# Altium footprint library LimeMicroAltiumLib.PcbLib: 876 footprints (part 41 of 57)
Each footprint in its own frame and in the unit in brackets; x right, y up, seen from the top. Pads: shape width x height; smd on the part's side, far side on the other; paste and mask are expansions set on the pad; w line width, h text height; cw(c..) or ccw(c..) is an arc to the next point about the centre after c.
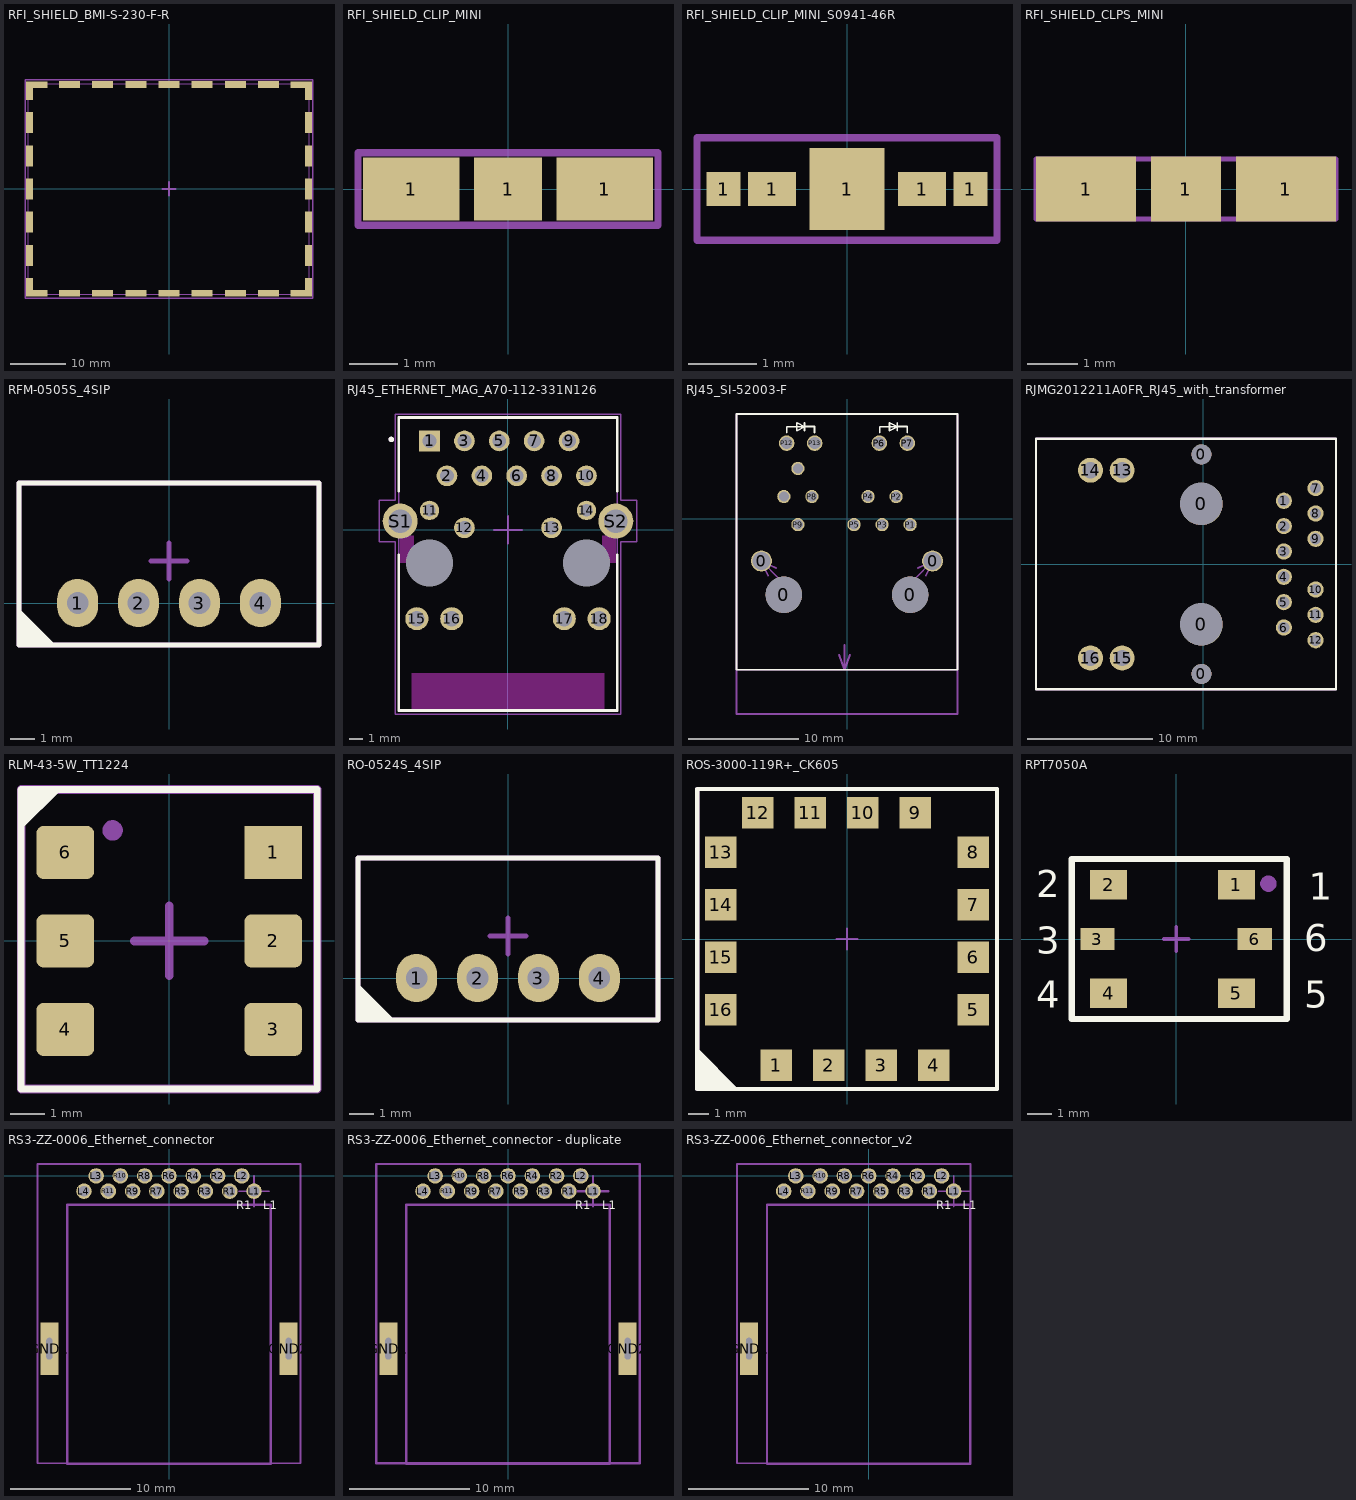
[diagram p40: the footprints below, top view; thin cyan lines are the x and y axes]

## RFI_SHIELD_28x42 [mm] "RFI SHIELD SMS-459C"
height 3
3D body: height 3, standoff 2.9, extent 0.525,0.525 27.788,41.813
3D body: height 3, standoff 0, extent 0.525,0 27.788,0.525
3D body: height 3, standoff 0, extent 0,0 0.525,42.338
3D body: height 3, standoff 0, extent 27.788,0 28.313,42.338
3D body: height 3, standoff 0, extent 0.525,41.813 27.788,42.338

## RFI_SHIELD_BMI-S-230-F-R [mm]
pads (32):
  rect 1.2x3.35 smd mask+0.05: 1(-25.2,-17.787) 1(-25.2,17.762) 1(25.2,-17.787) 1(25.2,17.762)
  rect 1.2x3.8 smd mask+0.05: 1(-25.2,-12.013) 1(-25.2,-6.013) 1(-25.2,-0.012) 1(-25.2,5.988) 1(-25.2,11.988) 1(25.2,-12.013) 1(25.2,-6.013) 1(25.2,-0.012) 1(25.2,5.988) 1(25.2,11.988)
  rect 3.85x1.2 smd mask+0.05: 1(-23.875,-18.862) 1(-23.875,18.838) 1(23.875,-18.862) 1(23.875,18.838)
  rect 3.8x1.2 smd mask+0.05: 1(-18,-18.837) 1(-18,18.863) 1(-12,-18.837) 1(-12,18.863) 1(-6,-18.837) 1(-6,18.863) 1(0,-18.837) 1(0,18.863) 1(6,-18.837) 1(6,18.863) 1(12,-18.837) 1(12,18.863) 1(18,-18.837) 1(18,18.863)
Mechanical 13:
  lines w0.15: -25.425,-19.062 -25.425,19.037 25.375,19.037 25.375,-19.062 -25.425,-19.062 ; -17.65,-19.062 -17.65,-19.063
Mechanical 15:
  lines w0.3: -1.25,0 1.25,0 ; 0,-1.25 0,1.25 ; -26,-19.75 -26,19.75 26,19.75 26,-19.75 -26,-19.75
  text "RF shield (frame + cover)" at -8.25,-19 h0.55
  text ".Designator" at 0,0 h0.55
3D body "Masach Technologies-MS511-20.STEP": height 6.6, standoff -0.8, extent -26.15,-19.8 26.15,19.8

## RFI_SHIELD_CLIP_MINI [mm] "RFI SHIELD CLIP MINI TIN SMD, S0971-46R"
pads (3):
  rect 2x1.3 smd mask+0.05: 1(-2,0) 1(2,0)
  rect 1.4x1.3 smd mask+0.05: 1(0,0)
Mechanical 15:
  lines w0.15: -0.2,0 0,0 ; 0,-0.2 0,0 ; 0,0.2 0,0 ; 0.2,0 0,0 ; -3.1,-0.75 -3.1,0.75 3.1,0.75 3.1,-0.75 -3.1,-0.75
  text ".Designator" at 0,0 h0.55
3D body: height 1, standoff 0, extent -2.6,-0.5 -0.7,-0.4
3D body: height 0.2, standoff 0, extent -2.9,-0.5 2.9,0.5
3D body: height 1, standoff 0, extent -2.6,0.4 -0.7,0.5
3D body: height 1, standoff 0, extent 0.7,0.4 2.6,0.5
3D body: height 1, standoff 0, extent 0.7,-0.5 2.6,-0.4

## RFI_SHIELD_CLIP_MINI_S0941-46R [mm] "RFI SHIELD CLIP MINI TIN SMD, S0941-46R"
pads (5):
  rect 0.5x0.5 smd mask+0.05: 1(-1.81,0) 1(1.81,0)
  rect 0.7x0.5 smd mask+0.05: 1(-1.1,0) 1(1.1,0)
  rect 1.1x1.2 smd mask+0.05: 1(0,0)
Top Solder:
  region: -1.8,-0.3 1.7,-0.3 1.7,0.3 -1.8,0.3
Mechanical 15:
  lines w0.11: -2.2,-0.75 2.2,-0.75 2.2,0.75 -2.2,0.75 -2.2,-0.75
  lines w0.15: -0.2,0 0,0 ; 0,-0.2 0,0 ; 0,0.2 0,0 ; 0.2,0 0,0
  text ".Designator" at 0,0 h0.55
3D body "s0941-46.stp": height 1, standoff 0, extent -1.95,-0.55 1.95,0.55

## RFI_SHIELD_CLPS_MINI [mm] "RFI SHIELD CLIP MINI TIN SMD, S0971-46R"
pads (3):
  rect 2x1.3 smd mask+0.05: 1(-2,0) 1(2,0)
  rect 1.4x1.3 smd mask+0.05: 1(0,0)
Mechanical 15:
  lines w0.1: -0.2,0 0,0 ; 0,-0.2 0,0 ; 0,0.2 0,0 ; 0.2,0 0,0 ; -3,-0.6 3,-0.6 3,0.6 -3,0.6 -3,-0.6
  text ".Designator" at 0,0 h0.55
3D body: height 1, standoff 0, extent 0.7,-0.5 2.6,-0.4
3D body: height 1, standoff 0, extent 0.7,0.4 2.6,0.5
3D body: height 1, standoff 0, extent -2.6,0.4 -0.7,0.5
3D body: height 0.2, standoff 0, extent -2.9,-0.5 2.9,0.5
3D body: height 1, standoff 0, extent -2.6,-0.5 -0.7,-0.4

## RFM-0505S_4SIP [mm] "24V 1W DCDC converter module"
pads (4):
  oval 1.7x2 hole 0.9 mask+0.05: 1(-3.81,0) 2(-1.27,0) 3(1.27,0) 4(3.81,0)
Top Overlay:
  region: -4.75,-1.75 -6.25,-0.25 -6.25,-1.75
  lines w0.2: -6.25,-1.75 6.25,-1.75 6.25,5 -6.25,5 -6.25,-1.75
Mechanical 15:
  circle w0.4: c-3.81,0 r0.115
  lines w0.2: -0.75,1.75 0,1.75 ; 0,1 0,1.75 ; 0,2.5 0,1.75 ; 0.75,1.75 0,1.75 ; -6.25,-1.75 6.25,-1.75 6.25,5 -6.25,5 -6.25,-1.75
  text ".Designator" at 0,1.75 h0.55
3D body "User Library-4-Lead SIP_AM1S-1205SZ_Aimtec_DC-DC_Converter_1_Watt.step": height 10.2, standoff -3, extent -5.842,-1.32 5.842,4.68

## RJ45_ETHERNET_MAG_A70-112-331N126 [mm]
pads (22):
  rect 1.508x1.508 hole 1: 1(-5.715,6.475)
  round 1.508 hole 1: 2(-4.445,3.935) 3(-3.175,6.475) 4(-1.905,3.935) 5(-0.635,6.475) 6(0.635,3.935) 7(1.905,6.475) 8(3.175,3.935) 9(4.445,6.475) 10(5.715,3.935) 12(-3.175,0.145) 13(3.175,0.145)
  round 1.408 hole 0.9: 11(-5.715,1.415) 14(5.715,1.415)
  round 1.68 hole 1.12: 15(-6.64,-6.475) 16(-4.1,-6.475) 17(4.1,-6.475) 18(6.64,-6.475)
  round 2.55 hole 1.7: S1(-7.85,0.635) S2(7.85,0.635)
  round 3.35 hole 3.4 unplated: ""(-5.715,-2.415) ""(5.715,-2.415)
Top Overlay:
  circle w0.2: c-8.5,6.585 r0.1
  lines w0.2: -7.95,-1.815 -7.95,-13.165 7.95,-13.165 7.95,-1.815 ; -7.95,2.835 -7.95,8.185 7.95,8.185 7.95,2.835
Keep-Out Layer:
  region: 7.005,-13.165 -7.005,-13.165 -7.005,-10.465 7.005,-10.465
  region: 7.85,-2.415 6.875,-2.415 6.875,-0.415 7.85,-0.415
  region: -6.875,-2.415 -7.85,-2.415 -7.85,-0.415 -6.875,-0.415
Mechanical 13:
  circle w0.2: c-8.5,6.585 r0.1
  lines w0.127: -7.95,-13.165 7.95,-13.165 7.95,8.185 -7.95,8.185 -7.95,-13.165
Mechanical 15:
  lines w0.1: -9.38,-0.885 -9.38,2.155 -8.2,2.155 -8.2,8.435 8.2,8.435 8.2,2.155 9.38,2.155 9.38,-0.885 8.2,-0.885 8.2,-13.415 -8.2,-13.415 -8.2,-0.885 -9.38,-0.885
  lines w0.15: -1,0 0,0 ; 0,-1 0,0 ; 0,1 0,0 ; 1,0 0,0
  text "14" at 5.4,1.2 h0.55
  text "11" at -6,1.2 h0.55
  text "9" at 4.3,6.3 h0.55
  text "1" at -5.8,6.3 h0.55
  text ".Designator" at 0,0 h0.55
3D body "A70-112-331N126--3DModel-STEP-56544.STEP": height 13.65, standoff -3.3, extent -8.075,-13.29 8.125,8.21

## RJ45_SI-52003-F [mm]
pads (17):
  round 1.9 hole 1.6 mask+0.05: 0(-7.745,-3.81) 0(7.745,-3.81)
  round 3.3 hole 3.3 unplated mask+0.05: 0(-5.715,-6.86) 0(5.715,-6.86)
  round 1.2 hole 0.9 mask+0.05: P1(5.715,-0.51) P2(4.445,2.03) P3(3.175,-0.51) P4(1.905,2.03) P5(0.635,-0.51) P8(-3.175,2.03) P9(-4.445,-0.51) P10(-5.715,2.03) P11(-4.445,4.57)
  round 1.4 hole 1.1 mask+0.05: P6(2.925,6.86) P7(5.465,6.86) P12(-5.465,6.86) P13(-2.925,6.86)
Top Overlay:
  lines w0.15: -5.44,7.815 -5.44,8.34 -3.84,8.34 ; -3.84,7.99 -3.84,8.69 ; -3.84,8.365 -2.94,8.365 -2.94,7.815 ; 2.95,7.815 2.95,8.34 4.55,8.34 ; 4.55,7.99 4.55,8.69 ; 4.55,8.365 5.45,8.365 5.45,7.815 ; -3.84,8.34 -4.54,8.69 -4.54,7.99 -3.84,8.34 ; 4.55,8.34 3.85,7.99 3.85,8.69 4.55,8.34 ; -10,-13.66 -10,9.5 10,9.5 10,-13.66 -10,-13.66
Mechanical 15:
  lines w0.15: -10,-13.66 10,-13.66 ; -7.119,-5.143 -7.745,-3.81 ; -6.412,-4.436 -7.745,-3.81 ; -6.147,-5.408 -7.745,-3.81 ; -0.725,-12.275 -0.225,-13.66 ; -0.225,-11.4 -0.225,-13.66 ; 0.275,-12.275 -0.225,-13.66 ; 6.147,-5.408 7.745,-3.81 ; 6.412,-4.436 7.745,-3.81 ; 7.119,-5.143 7.745,-3.81 ; -10,-17.65 10,-17.65 10,9.5 -10,9.5 -10,-17.65
  text "Assembly Note: solder plated holes" at -8.9,-6.45 h0.55
  text ".Designator" at -0.05,-0.025 h0.55
  text "6 / (A)" at 2.225,5.925 h0.55
  text "7 / (C)" at 4.85,5.95 h0.55
  text "13 / (C)" at -3.625,5.95 h0.55
  text "12 / (A)" at -6.15,5.95 h0.55
  text "11" at -4.725,4.25 h0.55
  text "10" at -6.025,1.75 h0.55
  text "9" at -4.6,-0.8 h0.55
  text "8" at -3.3,1.75 h0.55
  text "5" at 0.525,-0.725 h0.55
  text "4" at 1.875,1.825 h0.55
  text "3" at 3.075,-0.775 h0.55
  text "2" at 4.375,1.75 h0.55
  text "1" at 5.625,-0.7 h0.55
  text "board edge" at -2.7,-11.05 h0.55
3D body: height 0, standoff -2.5, extent 6.951,-4.608 8.545,-3.011
3D body: height 0, standoff -2.5, extent -8.539,-4.608 -6.945,-3.011
3D body: height 0, standoff -2.5, extent 4.115,-8.457 7.315,-5.263
3D body: height 0, standoff -2.5, extent -7.315,-8.457 -4.115,-5.263
3D body: height 0, standoff -2.5, extent 5.318,-0.909 6.115,-0.111
3D body: height 0, standoff -2.5, extent 2.778,-0.909 3.575,-0.111
3D body: height 0, standoff -2.5, extent 0.238,-0.909 1.035,-0.111
3D body: height 0, standoff -2.5, extent -4.842,-0.909 -4.045,-0.111
3D body: height 0, standoff -2.5, extent -6.112,1.631 -5.315,2.429
3D body: height 0, standoff -2.5, extent -3.572,1.631 -2.775,2.429
3D body: height 0, standoff -2.5, extent 4.048,1.631 4.845,2.429
3D body: height 0, standoff -2.5, extent 1.508,1.631 2.305,2.429
3D body: height 0, standoff -2.5, extent -4.842,4.171 -4.045,4.969
3D body: height 0, standoff -2.5, extent 4.969,6.361 5.965,7.359
3D body: height 0, standoff -2.5, extent 2.429,6.361 3.425,7.359
3D body: height 0, standoff -2.5, extent -3.421,6.361 -2.425,7.359
3D body: height 0, standoff -2.5, extent -5.961,6.361 -4.965,7.359
3D body "ACC-M-RJE60-188-5X01-REVT1_v2.STEP": height 14.73, standoff -0.04, extent -9.105,-17.62 9.105,3.87
3D body: height 13.6, standoff 0, extent -8,3.025 8,7.7

## RJMG2012211A0FR_RJ45_with_transformer [mm]
pads (20):
  round 1.6 hole 1.6 mask+0.05: 0(-0.125,-8.79) 0(-0.125,8.79)
  round 3.4 hole 3.4 unplated mask+0.05: 0(-0.125,-4.825) 0(-0.125,4.825)
  round 1.3 hole 0.9 mask+0.05: 1(6.475,5.075) 2(6.475,3.045) 3(6.475,1.015) 4(6.475,-1.015) 5(6.475,-3.045) 6(6.475,-5.075) 7(9.015,6.09) 8(9.015,4.06) 9(9.015,2.03) 10(9.015,-2.03) 11(9.015,-4.06) 12(9.015,-6.09)
  round 2 hole 1.3 mask+0.05: 13(-6.475,7.52) 14(-9.015,7.52) 15(-6.475,-7.52) 16(-9.015,-7.52)
Top Overlay:
  lines w0.2: -13.375,-10.025 10.65,-10.025 10.65,10.05 -13.375,10.05 -13.375,-10.025
Mechanical 15:
  lines w0.2: -13.375,-10.025 10.65,-10.025 10.65,10.05 -13.375,10.05 -13.375,-10.025
  text "13" at -7,7.1 h0.55
  text "14" at -9.7,7.1 h0.55
  text "15" at -7.1,-8 h0.55
  text "16" at -9.6,-8 h0.55
  text "12" at 8.5,-6.5 h0.55
  text "6" at 6.1,-5.4 h0.55
  text "8" at 8.7,3.6 h0.55
  text "2" at 6.2,2.7 h0.55
  text "7" at 8.7,5.7 h0.55
  text "1" at 6.3,4.6 h0.55
  text ".Designator" at 0,0 h0.55
3D body "RJMG2012211A0FR.STEP": height 12.5, standoff -3.33, extent -13.395,-10.021 10.655,10.071

## RLM-43-5W_TT1224 [mm]
pads (6):
  rect 1.65x1.52 smd: 1(2.985,2.54)
  rrect25% 1.65x1.52 smd: 2(2.985,0) 3(2.985,-2.54) 4(-2.985,-2.54) 5(-2.985,0) 6(-2.985,2.54)
Top Overlay:
  region: -4.263,3.187 -3.088,4.362 -4.262,4.363
  lines w0.2: -4.25,-4.25 -4.25,4.35 4.25,4.35 4.25,-4.25 -4.25,-4.25
Mechanical 15:
  circle w0.3: c-1.625,3.175 r0.141
  lines w0.254: -1,0 0,0 ; 0,-1 0,0 ; 0,1 0,0 ; 1,0 0,0 ; -4.25,-4.25 4.25,-4.25 4.25,4.35 -4.25,4.35 -4.25,-4.25
  text ".Designator" at 0,0 h0.55
  text "1" at 3,2.5 h0.55
  text "6" at -3,2.5 h0.55
  text "Package marking" at -1.35,3.8 h0.55
3D body "User Library-RLM 751.STEP": height 4.09, standoff -0.03, extent -3.175,-3.935 3.175,3.935

## RO-0524S_4SIP [mm] "24V 1W DCDC converter module"
pads (4):
  oval 1.7x2 hole 0.9 mask+0.05: 1(-3.81,0) 2(-1.27,0) 3(1.27,0) 4(3.81,0)
Top Overlay:
  region: -4.75,-1.75 -6.25,-0.25 -6.25,-1.75
  lines w0.2: -6.25,-1.75 6.25,-1.75 6.25,5 -6.25,5 -6.25,-1.75
Mechanical 15:
  circle w0.4: c-3.81,0 r0.115
  lines w0.2: -0.75,1.75 0,1.75 ; 0,1 0,1.75 ; 0,2.5 0,1.75 ; 0.75,1.75 0,1.75 ; -6.25,-1.75 6.25,-1.75 6.25,5 -6.25,5 -6.25,-1.75
  text ".Designator" at 0,1.75 h0.55
3D body "User Library-4-Lead SIP_AM1S-1205SZ_Aimtec_DC-DC_Converter_1_Watt.step": height 10.2, standoff -3, extent -5.842,-1.32 5.842,4.68

## ROS-3000-119R+_CK605 [mm]
pads (16):
  rect 1.52x1.52 smd: 1(-3.43,-6.1) 2(-0.89,-6.1) 3(1.65,-6.1) 4(4.19,-6.1) 5(6.1,-3.43) 6(6.1,-0.89) 7(6.1,1.65) 8(6.1,4.19) 9(3.3,6.1) 10(0.76,6.1) 11(-1.78,6.1) 12(-4.32,6.1) 13(-6.1,4.19) 14(-6.1,1.65) 15(-6.1,-0.89) 16(-6.1,-3.43)
Top Overlay:
  region: -5.25,-7.25 -7.25,-5.25 -7.25,-7.25
  lines w0.2: -7.24,-7.25 7.25,-7.25 7.25,7.25 -7.24,7.25 -7.24,-7.25
Mechanical 15:
  circle w0.254: c-6.24,4.25 r0.056
  lines w0.1: -0.5,0 0,0 ; 0,-0.5 0,0 ; 0,0.5 0,0 ; 0.5,0 0,0
  lines w0.2: -7.24,-7.25 -7.24,7.25 7.25,7.25 7.25,-7.25 -7.24,-7.25
  text ".Designator" at 0,0 h0.55
3D body "User Library-ROS-425-319 in CK605 case detailed.STEP": height 4.57, standoff 0, extent -6.35,-6.35 6.35,6.35

## RPT7050A [mm] "Rakon's Pluto+ ASIC"
pads (6):
  rect 1.5x1.2 smd: 1(2.45,2.2) 2(-2.75,2.2) 4(-2.75,-2.2) 5(2.45,-2.2)
  rect 1.4x0.9 smd: 3(-3.2,0) 6(3.2,0)
Top Overlay:
  lines w0.254: -4.25,-3.25 4.5,-3.25 4.5,3.25 -4.25,3.25 -4.25,3 -4.25,-3.25
  text "1" at 5.4,1.6 h1.1
  text "5" at 5.2,-2.8 h1.1
  text "6" at 5.2,-0.5 h1.1
  text "4" at -5.7,-2.8 h1.1
  text "3" at -5.7,-0.6 h1.1
  text "2" at -5.7,1.7 h1.1
Mechanical 15:
  circle w0.35: c3.75,2.25 r0.158
  lines w0.15: -0.5,0 0.5,0 ; 0,-0.5 0,0.5 ; -4.25,-3.25 -4.25,3.25 4.5,3.25 4.5,-3.25 -4.25,-3.25
  text ".Designator" at 0,0 h0.55
3D body: height 1, standoff 0, extent -3.5,-2.3 3.2,2.3
3D body "RES 0402 (1005 metric).STEP": height 1.4, standoff 1, extent -2.525,-1.975 -1.475,-1.425
3D body "Crystal TXC Corp 7M series.STEP": height 1.8, standoff 1, extent -2.95,-0.6 0.35,2
3D body "CAP 0402 (1005 metric).STEP": height 1.55, standoff 1, extent 2.125,-1.025 2.675,0.025
3D body "CAP 0402 (1005 metric).STEP": height 1.55, standoff 1, extent 2.125,0.775 2.675,1.825
3D body "CAP 0402 (1005 metric).STEP": height 1.55, standoff 1, extent 0.975,-1.975 2.025,-1.425
3D body "CAP 0402 (1005 metric).STEP": height 1.55, standoff 1, extent -0.825,-1.975 0.225,-1.425

## RS3-ZZ-0006_Ethernet_connector [mm]
pads (17):
  rect 1.5x4.4 hole 0.5 slot 1.8 at 90 deg mask+0.05: GND1(-10,-14.43) GND2(10,-14.43)
  round 1.3 hole 0.9 mask+0.05: L1(7.105,-1.27) L2(6.09,0) L3(-6.09,0) L4(-7.105,-1.27) R1(5.075,-1.27) R2(4.06,0) R3(3.045,-1.27) R4(2.03,0) R5(1.015,-1.27) R6(0,0) R7(-1.015,-1.27) R8(-2.03,0) R9(-3.045,-1.27) R10(-4.06,0) R11(-5.075,-1.27)
Top Overlay:
  text "R1" at 5.625,-2.775 h0.7
  text "L1" at 7.875,-2.775 h0.7
Mechanical 13:
  lines w0.2: -8.5,-24.07 -8.5,-2.4 8.5,-2.4 8.5,-24.07 -8.5,-24.07
Mechanical 15:
  lines w0.15: 5.835,-1.27 7.105,-1.27 ; 7.105,-2.54 7.105,-1.27 ; 7.105,0 7.105,-1.27 ; 8.375,-1.27 7.105,-1.27 ; -11,-24 11,-24 11,1 -11,1 -11,-24
  text "L1" at 7.875,-2.775 h0.7
  text "R1" at 4.5,-3 h0.7
  text "L4" at -9.5,-2.5 h0.7
  text "L3" at -8.5,0 h0.7
  text "L2" at 7.5,0 h0.7
  text ".Designator" at 0,-12.5 h0.7

## RS3-ZZ-0006_Ethernet_connector - duplicate [mm] "Footprint created via PCB measurement and approximation"
pads (17):
  rect 1.5x4.4 hole 0.5 slot 1.8 at 90 deg mask+0.05: GND1(-10,-14.43) GND2(10,-14.43)
  round 1.3 hole 0.9 mask+0.05: L1(7.105,-1.27) L2(6.09,0) L3(-6.09,0) L4(-7.105,-1.27) R1(5.075,-1.27) R2(4.06,0) R3(3.045,-1.27) R4(2.03,0) R5(1.015,-1.27) R6(0,0) R7(-1.015,-1.27) R8(-2.03,0) R9(-3.045,-1.27) R10(-4.06,0) R11(-5.075,-1.27)
Top Overlay:
  text "L1" at 7.875,-2.775 h0.7
  text "R1" at 5.625,-2.775 h0.7
Mechanical 13:
  lines w0.2: -8.5,-24.07 8.5,-24.07 8.5,-2.4 -8.5,-2.4 -8.5,-24.07
Mechanical 15:
  lines w0.2: 5.835,-1.27 7.105,-1.27 ; 7.105,-2.54 7.105,-1.27 ; 7.105,0 7.105,-1.27 ; 8.375,-1.27 7.105,-1.27 ; -11,-24 -11,1 11,1 11,-24 -11,-24
  text ".Designator" at 0,-12.5 h0.7
  text "L2" at 7.5,0 h0.7
  text "L3" at -8.5,0 h0.7
  text "L4" at -9.5,-2.5 h0.7
  text "R1" at 4.5,-3 h0.7
  text "L1" at 7.875,-2.775 h0.7

## RS3-ZZ-0006_Ethernet_connector_v2 [mm]
pads (16):
  rect 1.5x4.4 hole 0.5 slot 1.8 at 90 deg mask+0.05: GND1(-10,-14.43)
  round 1.3 hole 0.9 mask+0.05: L1(7.105,-1.27) L2(6.09,0) L3(-6.09,0) L4(-7.105,-1.27) R1(5.075,-1.27) R2(4.06,0) R3(3.045,-1.27) R4(2.03,0) R5(1.015,-1.27) R6(0,0) R7(-1.015,-1.27) R8(-2.03,0) R9(-3.045,-1.27) R10(-4.06,0) R11(-5.075,-1.27)
Top Overlay:
  text "L1" at 7.875,-2.775 h0.7
  text "R1" at 5.625,-2.775 h0.7
Mechanical 13:
  lines w0.2: -8.5,-24.07 8.5,-24.07 8.5,-2.4 -8.5,-2.4 -8.5,-24.07
Mechanical 15:
  lines w0.15: 5.835,-1.27 7.105,-1.27 ; 7.105,-2.54 7.105,-1.27 ; 7.105,0 7.105,-1.27 ; 8.375,-1.27 7.105,-1.27 ; -11,-24 -11,1 8.5,1 8.5,-24 -11,-24
  text ".Designator" at 0,-12.5 h0.7
  text "L2" at 7.5,0 h0.7
  text "L3" at -8.5,0 h0.7
  text "L4" at -9.5,-2.5 h0.7
  text "R1" at 4.5,-3 h0.7
  text "L1" at 7.875,-2.775 h0.7